# Altium footprint library KF126-4P.PcbLib: 1 footprints
Each footprint in its own frame and in the unit in brackets; x right, y up, seen from the top. Pads: shape width x height; smd on the part's side, far side on the other; paste and mask are expansions set on the pad; w line width, h text height; cw(c..) or ccw(c..) is an arc to the next point about the centre after c.
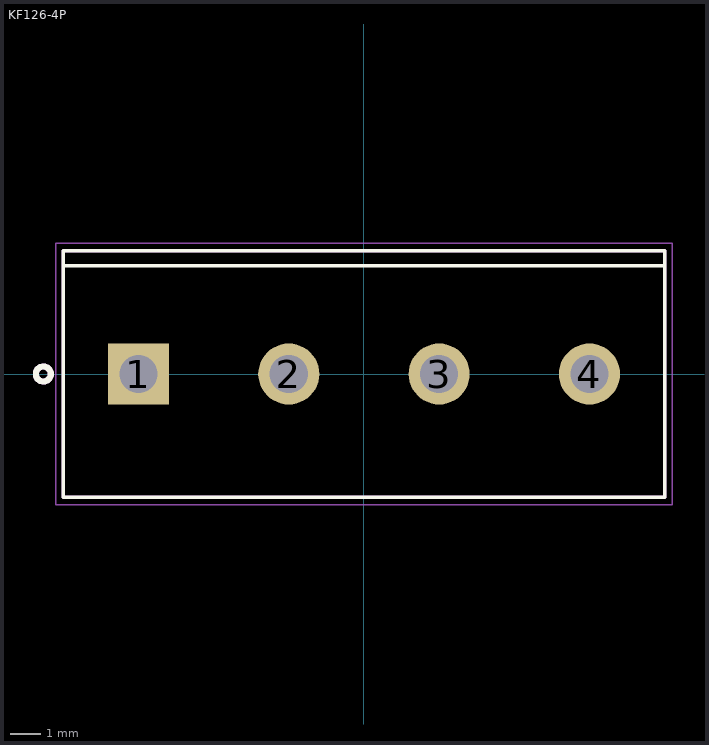
[diagram p0: the footprint, top view; thin cyan lines are the x and y axes]

## KF126-4P [mil] "KF126-4P"
height 393.7
pads (4):
  rect 80x80 hole 50: 1(-295.28,0)
  round 80 hole 50: 2(-98.43,0) 3(98.43,0) 4(295.28,0)
Top Overlay:
  circle w8: c-419.8,0 r9.84
  lines w5: -393.1,141.73 393.58,141.73 ; -393.7,-161.42 393.7,-161.42 393.7,161.42 -393.7,161.42 -393.7,-161.42
Mechanical 13:
  circle w8: c-419.8,0 r9.84
  lines w5: -393.7,-161.42 393.7,-161.42 393.7,161.42 -393.7,161.42 -393.7,-161.42
Mechanical 15:
  lines w1.97: -403.54,-171.26 -403.54,171.26 403.54,171.26 403.54,-171.26 -403.54,-171.26
3D body "KF126-4P.STEP": height 394.7, standoff -136.8, extent -417.32,-161.42 393.7,161.42